# Altium footprint library CHIP-Library.PcbLib: 345 footprints (part 13 of 22)
Each footprint in its own frame and in the unit in brackets; x right, y up, seen from the top. Pads: shape width x height; smd on the part's side, far side on the other; paste and mask are expansions set on the pad; w line width, h text height; cw(c..) or ccw(c..) is an arc to the next point about the centre after c.
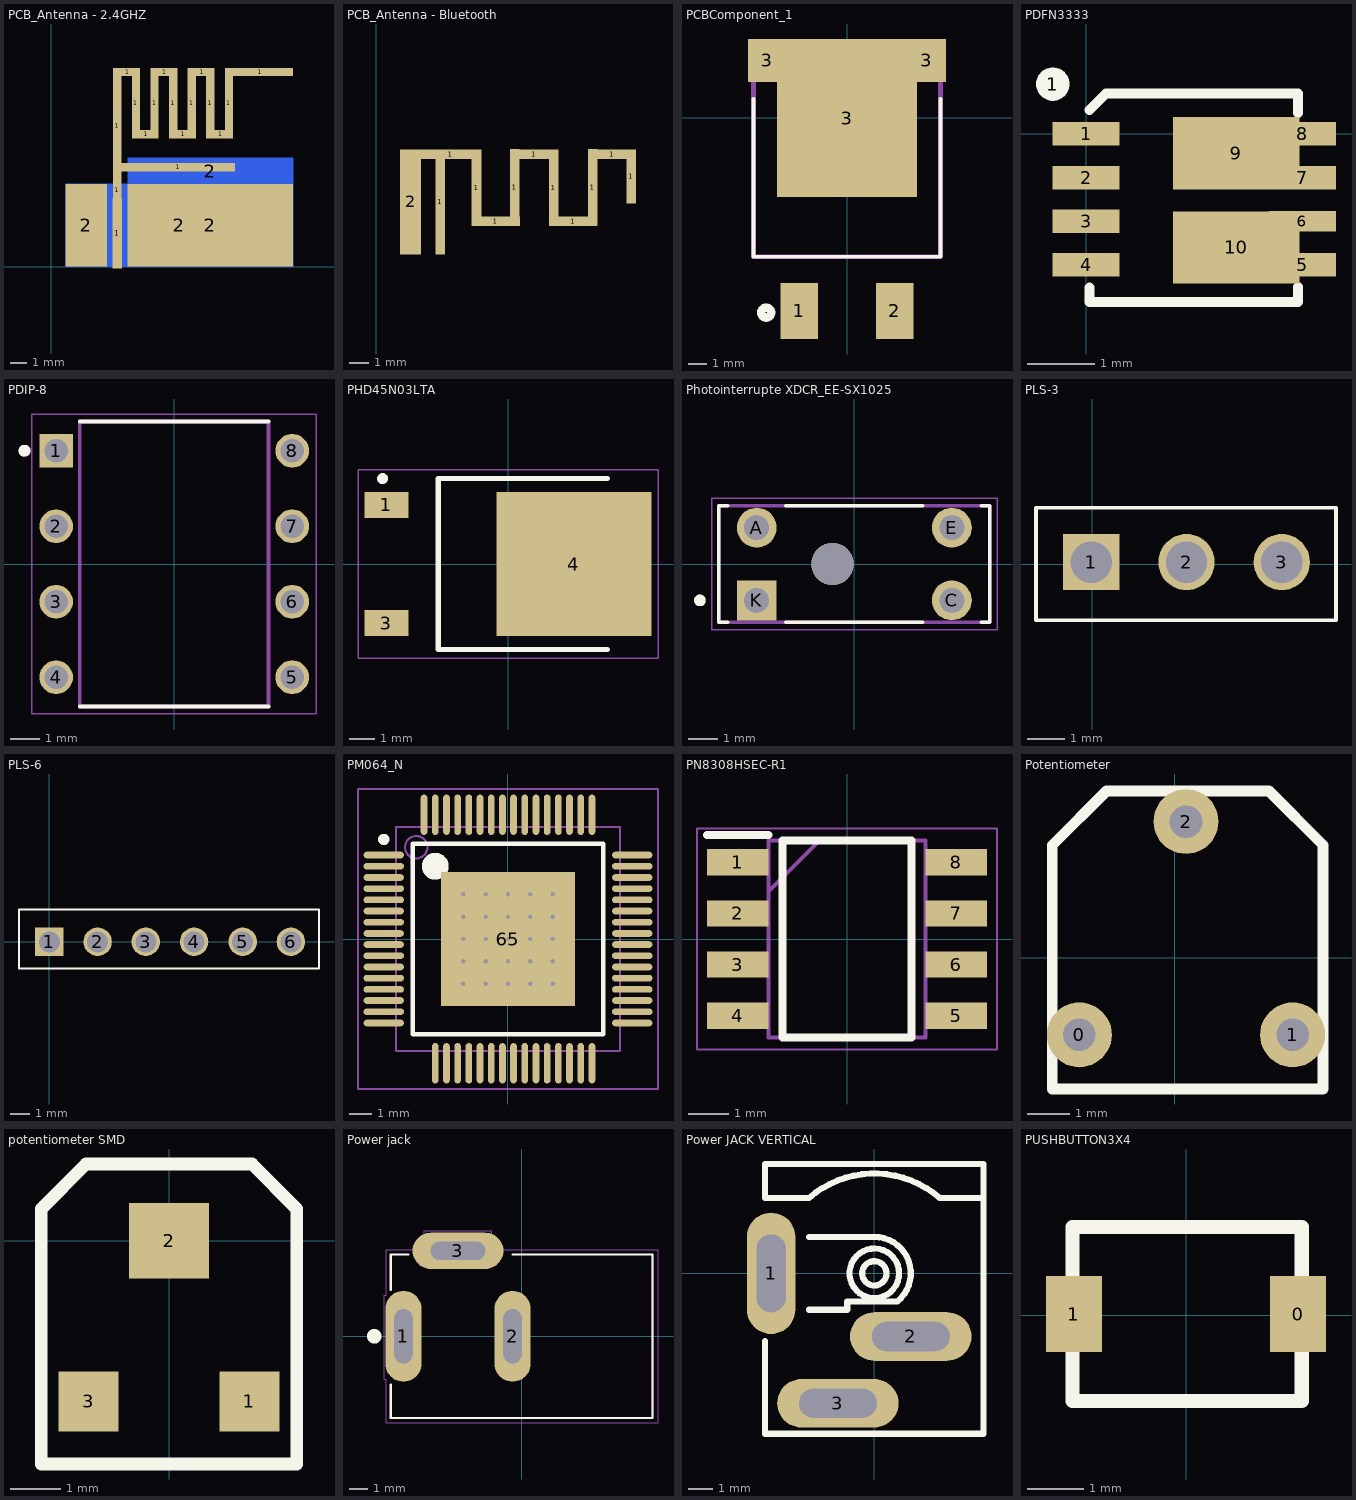
[diagram p12: the footprints below, top view; thin cyan lines are the x and y axes]

## PCB_Antenna - 2.4GHZ [mil]
pads (21):
  rect 24x170 smd paste+0 mask+0: 1(160,80)
  rect 20x45 smd paste+0 mask+0: 1(160,185)
  rect 20x280 smd paste+0 mask+0: 1(160,340)
  rect 60x20 smd paste+0 mask+0: 1(185,470) 1(230,320) 1(275,470) 1(320,320) 1(365,470) 1(410,320)
  rect 20x170 smd paste+0 mask+0: 1(205,395) 1(250,395) 1(295,395) 1(340,395) 1(385,395) 1(430,395)
  rect 274x20 smd paste+0 mask+0: 1(307,240)
  rect 160x20 smd paste+0 mask+0: 1(505,470)
  rect 100x200 smd paste+0 mask+0: 2(85,100)
  rect 550x200 smd far side paste+0 mask+0: 2(310,100)
  rect 400x200 smd paste+0 mask+0: 2(385,100)
  rect 400x65 smd far side paste+0 mask+0: 2(385,230)

## PCB_Antenna - Bluetooth [mm]
pads (12):
  rect 0.5x5.5 smd paste+0 mask+0: 1(3.35,8)
  rect 3.2x0.5 smd paste+0 mask+0: 1(3.9,10.5)
  rect 0.5x4 smd paste+0 mask+0: 1(5.24,8.75) 1(7.239,8.763) 1(9.271,8.75) 1(11.303,8.763)
  rect 2.5x0.5 smd paste+0 mask+0: 1(6.25,7) 1(8.255,10.5) 1(10.287,6.985) 1(12.319,10.5)
  rect 0.5x2.8 smd paste+0 mask+0: 1(13.32,9.33)
  rect 1.1x5.5 smd paste+0 mask+0: 2(1.8,8)

## PCBComponent_1 [mm]
height 9.45
pads (5):
  rect 2x3 smd: 1(-2.54,-10.325) 2(2.54,-10.325)
  rect 2.032x2.286 smd paste-2: 3(-4.267,3.06) 3(4.267,3.06)
  rect 7.5x8.45 smd paste-5: 3(0,-0.025)
Top Overlay:
  circle w0.45: c-4.318,-10.414 r0.266
  lines w0.2: -5,1 -5,-7.425 5,-7.425 5,1
Top Paste:
  rectangle: 0.5,0.5 3.75,4.1
  rectangle: 0.5,-4 3.75,-0.5
  rectangle: -3.75,-4 -0.5,-0.5
  rectangle: -3.75,0.5 -0.5,4.1
Mechanical 13:
  lines w0.254: -5,-7.425 -5,2.175 5,2.175 5,-7.425 -5,-7.425

## PDFN3333 [mm]
height 2.65
pads (11):
  round 0.5 on Top Overlay: 1(-0.495,0.74)
  rect 1x0.35 smd: 1(0,0) 2(0,-0.65) 3(0,-1.3) 4(0,-1.95) 5(3.216,-1.95) 7(3.216,-0.65) 8(3.216,0)
  rect 1x0.3 smd: 6(3.216,-1.3)
  rect 1.88x1.075 smd: 9(2.232,-0.29) 10(2.232,-1.69)
Top Overlay:
  lines w0.15: 0.052,-2.5 3.152,-2.5 ; 0.052,0.355 0.297,0.6 3.152,0.6 3.152,0.31
  lines w0.152: 0.052,-2.5 0.052,-2.29 ; 3.152,-2.5 3.152,-2.28

## PDIP-8 [mm]
pads (8):
  rect 1.13x1.13 hole 0.78: 1(-3.97,3.81)
  round 1.13 hole 0.78: 2(-3.97,1.27) 3(-3.97,-1.27) 4(-3.97,-3.81) 5(3.97,-3.81) 6(3.97,-1.27) 7(3.97,1.27) 8(3.97,3.81)
Top Overlay:
  circle w0.2: c-5.035,3.81 r0.1
  lines w0.127: -3.175,-4.795 3.175,-4.795 ; -3.175,4.795 3.175,4.795
Mechanical 13:
  circle w0.2: c-5.035,3.81 r0.1
  lines w0.127: -3.175,-4.795 3.175,-4.795 3.175,4.795 -3.175,4.795 -3.175,-4.795
Mechanical 15:
  lines w0.05: -4.785,-5.045 4.785,-5.045 4.785,5.045 -4.785,5.045 -4.785,-5.045
3D body "step_temp.STEP": height 5.08, standoff -3.17, extent -5.461,-4.794 5.461,4.794

## PHD45N03LTA [mm] "TO-252-3"
height 22
pads (3):
  rect 1.7x1 smd: 1(-4.7,2.285) 3(-4.7,-2.285)
  rect 6x5.55 smd paste-4: 4(2.55,0)
Top Overlay:
  circle w0.2: c-4.85,3.3 r0.112
  lines w0.2: 3.85,-3.3 -2.7,-3.3 -2.7,3.3 3.85,3.3
Top Paste:
  region: 1.97,0.39 0.03,0.39 0.03,2.11 1.97,2.11
  region: 4.47,0.39 2.532,0.39 2.532,2.11 4.47,2.11
  region: 4.47,-2.114 2.534,-2.114 2.534,-0.39 4.47,-0.39
  region: 1.97,-2.11 0.03,-2.11 0.03,-0.39 1.97,-0.39
Mechanical 15:
  lines w0.05: -5.8,-3.65 5.8,-3.65 5.8,3.65 -5.8,3.65 -5.8,-3.65
3D body "User Library-TO-252-3.step": height 2.42, standoff 0.01, extent -5.24,-3.35 5.112,3.35

## Photointerrupte XDCR_EE-SX1025 [mm]
pads (5):
  round 1.368 hole 0.86: A(-3.35,1.25) C(3.35,-1.25) E(3.35,1.25)
  rect 1.368x1.368 hole 0.86: K(-3.35,-1.25)
  round 1.45 hole 1.45 unplated: ""(-0.75,0)
Top Overlay:
  circle w0.2: c-5.3,-1.25 r0.1
  lines w0.127: -4.355,-2 -4.65,-2 -4.65,2 -4.355,2 ; -2.345,-2 2.345,-2 ; -2.345,2 2.345,2 ; 4.355,-2 4.65,-2 4.65,2 4.355,2
Mechanical 13:
  circle w0.2: c-5.3,-1.25 r0.1
  lines w0.127: -4.65,-2 4.65,-2 4.65,2 -4.65,2 -4.65,-2
Mechanical 15:
  lines w0.05: -4.9,-2.25 4.9,-2.25 4.9,2.25 -4.9,2.25 -4.9,-2.25
3D body "step_temp.STEP": height 6, standoff -9, extent -4.063,-2.127 3.937,1.873

## PLS-3 [mm]
pads (3):
  rect 1.5x1.5 hole 1.1: 1(-0.025,0.05)
  round 1.5 hole 1.1: 2(2.515,0.05) 3(5.055,0.05)
Top Overlay:
  lines w0.1: -1.5,-1.5 -1.5,-1.4 -1.5,1.5 6.5,1.5 6.5,-1.5 -1.5,-1.5
3D body "PLS-3.STEP": height 8.54, standoff -3, extent -1.26,-1.225 6.36,1.315

## PLS-6 [mm]
pads (6):
  rect 1.5x1.5 hole 1.1: 1(0,0)
  round 1.5 hole 1.1: 2(2.54,0) 3(5.08,0) 4(7.62,0) 5(10.18,0) 6(12.72,0)
Top Overlay:
  lines w0.1: -1.6,-1.4 -1.6,1.7 14.2,1.7 14.2,-1.4 -1.6,-1.4
3D body "PLS-6.step": height 6.55, standoff -3, extent -1.32,-1.2 13.92,7.42

## PM064_N [mm] "64-Pin Thin Quad Flat Pack 0.5 mm Pitch, IPC Medium Density"
height 1.6
pads (65):
  oval 1.8x0.3 smd: 1(-5.55,3.75) 2(-5.55,3.25) 3(-5.55,2.75) 4(-5.55,2.25) 5(-5.55,1.75) 6(-5.55,1.25) 7(-5.55,0.75) 8(-5.55,0.25) 9(-5.55,-0.25) 10(-5.55,-0.75) 11(-5.55,-1.25) 12(-5.55,-1.75) 13(-5.55,-2.25) 14(-5.55,-2.75) 15(-5.55,-3.25) 16(-5.55,-3.75) 33(5.55,-3.75) 34(5.55,-3.25) 35(5.55,-2.75) 36(5.55,-2.25) 37(5.55,-1.75) 38(5.55,-1.25) 39(5.55,-0.75) 40(5.55,-0.25) 41(5.55,0.25) 42(5.55,0.75) 43(5.55,1.25) 44(5.55,1.75) 45(5.55,2.25) 46(5.55,2.75) 47(5.55,3.25) 48(5.55,3.75)
  oval 0.3x1.8 smd: 17(2.54,1.34) 18(-3.25,-5.55) 19(-2.75,-5.55) 20(-2.25,-5.55) 21(-1.75,-5.55) 22(-1.25,-5.55) 23(-0.75,-5.55) 24(-0.25,-5.55) 25(0.25,-5.55) 26(0.75,-5.55) 27(1.25,-5.55) 28(1.75,-5.55) 29(2.25,-5.55) 30(2.75,-5.55) 31(3.25,-5.55) 32(3.75,-5.55) 49(3.75,5.55) 50(3.25,5.55) 51(2.75,5.55) 52(2.25,5.55) 53(1.75,5.55) 54(1.25,5.55) 55(0.75,5.55) 56(0.25,5.55) 57(-0.25,5.55) 58(-0.75,5.55) 59(-1.25,5.55) 60(-1.75,5.55) 61(-2.25,5.55) 62(-2.75,5.55) 63(-3.25,5.55) 64(-3.75,5.55)
  rect 6x6 smd: 65(0,0)
via 2,-2 diameter 0.25 hole 0.2
via 1,-2 diameter 0.25 hole 0.2
via 0,-2 diameter 0.25 hole 0.2
via -1,-2 diameter 0.25 hole 0.2
via -2,-2 diameter 0.25 hole 0.2
via 2,-1 diameter 0.25 hole 0.2
via 1,-1 diameter 0.25 hole 0.2
via 0,-1 diameter 0.25 hole 0.2
via -1,-1 diameter 0.25 hole 0.2
via -2,-1 diameter 0.25 hole 0.2
via 2,0 diameter 0.25 hole 0.2
via 1,0 diameter 0.25 hole 0.2
via 0,0 diameter 0.25 hole 0.2
via -1,0 diameter 0.25 hole 0.2
via -2,0 diameter 0.25 hole 0.2
via 2,1 diameter 0.25 hole 0.2
via 1,1 diameter 0.25 hole 0.2
via 0,1 diameter 0.25 hole 0.2
via -1,1 diameter 0.25 hole 0.2
via -2,1 diameter 0.25 hole 0.2
via 2,2 diameter 0.25 hole 0.2
via 1,2 diameter 0.25 hole 0.2
via 0,2 diameter 0.25 hole 0.2
via -1,2 diameter 0.25 hole 0.2
via -2,2 diameter 0.25 hole 0.2
Top Overlay:
  circle w0.25: c-5.55,4.45 r0.125
  circle w0.6: c-3.25,3.25 r0.3
  lines w0.2: -4.25,-4.25 -4.25,4.25 4.25,4.25 4.25,-4.25 -4.25,-4.25
Mechanical 13:
  circle w0.1: c-4.1,4.1 r0.5
  lines w0.1: -5,-5 -5,5 5,5 5,-5 -5,-5
Mechanical 15:
  lines w0.1: -0.5,0 0.5,0 ; 0,-0.5 0,0.5 ; -6.7,-6.7 -6.7,6.7 6.7,6.7 6.7,-6.7 -6.7,-6.7
3D body: height 1.6, standoff 0, extent -5,-5 5,5

## PN8308HSEC-R1 [mm] "SOP8"
pads (8):
  rect 1.525x0.65 smd: 1(-2.712,1.905) 2(-2.712,0.635) 3(-2.712,-0.635) 4(-2.712,-1.905) 5(2.712,-1.905) 6(2.712,-0.635) 7(2.712,0.635) 8(2.712,1.905)
Top Overlay:
  lines w0.2: -3.475,2.58 -1.95,2.58 ; -1.6,-2.45 -1.6,2.45 1.6,2.45 1.6,-2.45 -1.6,-2.45
Mechanical 13:
  lines w0.1: -1.95,1.18 -0.68,2.45 ; -1.95,-2.45 -1.95,2.45 1.95,2.45 1.95,-2.45 -1.95,-2.45
Mechanical 15:
  lines w0.05: -3.725,-2.75 -3.725,2.75 3.725,2.75 3.725,-2.75 -3.725,-2.75
3D body "FR9886SOGTR.stp": height 1.75, standoff 0, extent -3,-2.45 3,2.45

## Potentiometer [mil] "THT"
pads (3):
  round 60 hole 30: 0(-88,-71) 1(108.85,-71) 2(10.43,125.85)
Top Overlay:
  lines w10: -113,-121 -113,104 -63,154 87,154 137,104 137,-121 -113,-121

## potentiometer SMD [mm] "SMD"
pads (3):
  rect 1.2x1.2 smd: 1(1.6,-3.2) 3(-1.6,-3.2)
  rect 1.6x1.5 smd: 2(0,0)
Top Overlay:
  lines w0.254: -2.54,-4.445 2.54,-4.445 2.54,0.635 1.651,1.524 -1.651,1.524 -2.54,0.635 -2.54,-4.445

## Power jack [mm]
pads (3):
  oval 2x5 hole 1 slot 3 at 90 deg: 1(-6.5,0) 2(-0.5,0)
  oval 5x2 hole 1 slot 3 at 0 deg: 3(-3.5,4.7)
Top Overlay:
  circle w0.4: c-8.1,0 r0.2
  lines w0.127: -7.2,-2.667 -7.2,-4.5 7.2,-4.5 7.2,4.5 -0.5,4.5 ; -7.2,2.54 -7.2,4.5 -6.223,4.5
Mechanical 13:
  lines w0.127: -7.2,-4.5 7.2,-4.5 7.2,4.5
Mechanical 15:
  lines w0.05: -7.55,-2.35 -7.55,2.25 -7.45,2.25 -7.45,4.75 -5.35,4.75 -5.35,5.8 -1.65,5.8 -1.65,4.75 7.5,4.75 7.5,-4.75 -7.45,-4.75 -7.45,-2.35 -7.55,-2.35
3D body "PJ-102A.STEP": height 11.01, standoff -3.49, extent -7.2,-4.572 7.2,4.828

## Power JACK VERTICAL [mm]
height 0.9
pads (3):
  oval 2x5 hole 1.2 slot 3.2 at 90 deg: 1(-4.25,0)
  oval 5x2 hole 1.2 slot 3.2 at 0 deg: 2(1.5,-2.6) 3(-1.5,-5.35)
Top Overlay:
  circle w0.254: c0,0 r1.02
  circle w0.254: c0,0 r0.5
  lines w0.254: -4.5,-2.794 -4.5,-6.604 4.5,-6.604 4.5,3.1 ; -2.695,-1.5 -1.118,-1.5 -1.118,-1.158 0.954,-1.158 ccw(c0,0) 0,1.5 -2.695,1.5 ; 4.5,3.1 2.695,3.1 ccw(c0,0) -2.695,3.1 -4.5,3.1 -4.5,4.5 4.5,4.5 4.5,3.1
3D body "Part1.stp": height 14.5, standoff -4.75, extent -4.627,-6.516 4.373,4.484

## PUSHBUTTON3X4 [mm]
pads (2):
  rect 1x1.35 smd: 0(1.993,0.025) 1(-2.007,0.025)
Top Overlay:
  lines w0.254: -2.032,-1.524 -2.032,1.575 2.057,1.575 2.057,-1.524 -2.032,-1.524